# Altium schematic symbol library SMBJ28CA-13.SchLib: 1 symbol
Pins are listed as number, name and electrical type; pins without a type are passive.

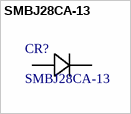
[diagram p0: symbol SMBJ28CA-13]

## SMBJ28CA-13
designator CR?
No Description Available; Manufacturer_Name: Diodes Inc; Copyright: Copyright (C) 2026 Ultra Librarian. All rights reserved.; Manufacturer_Part_Number: SMBJ28CA-13
footprint SMB_DIO
pins: 1, 2